# Altium schematic symbol library SmartClimate_BOM.SchLib: 29 symbols
Pins are listed as number, name and electrical type; pins without a type are passive.

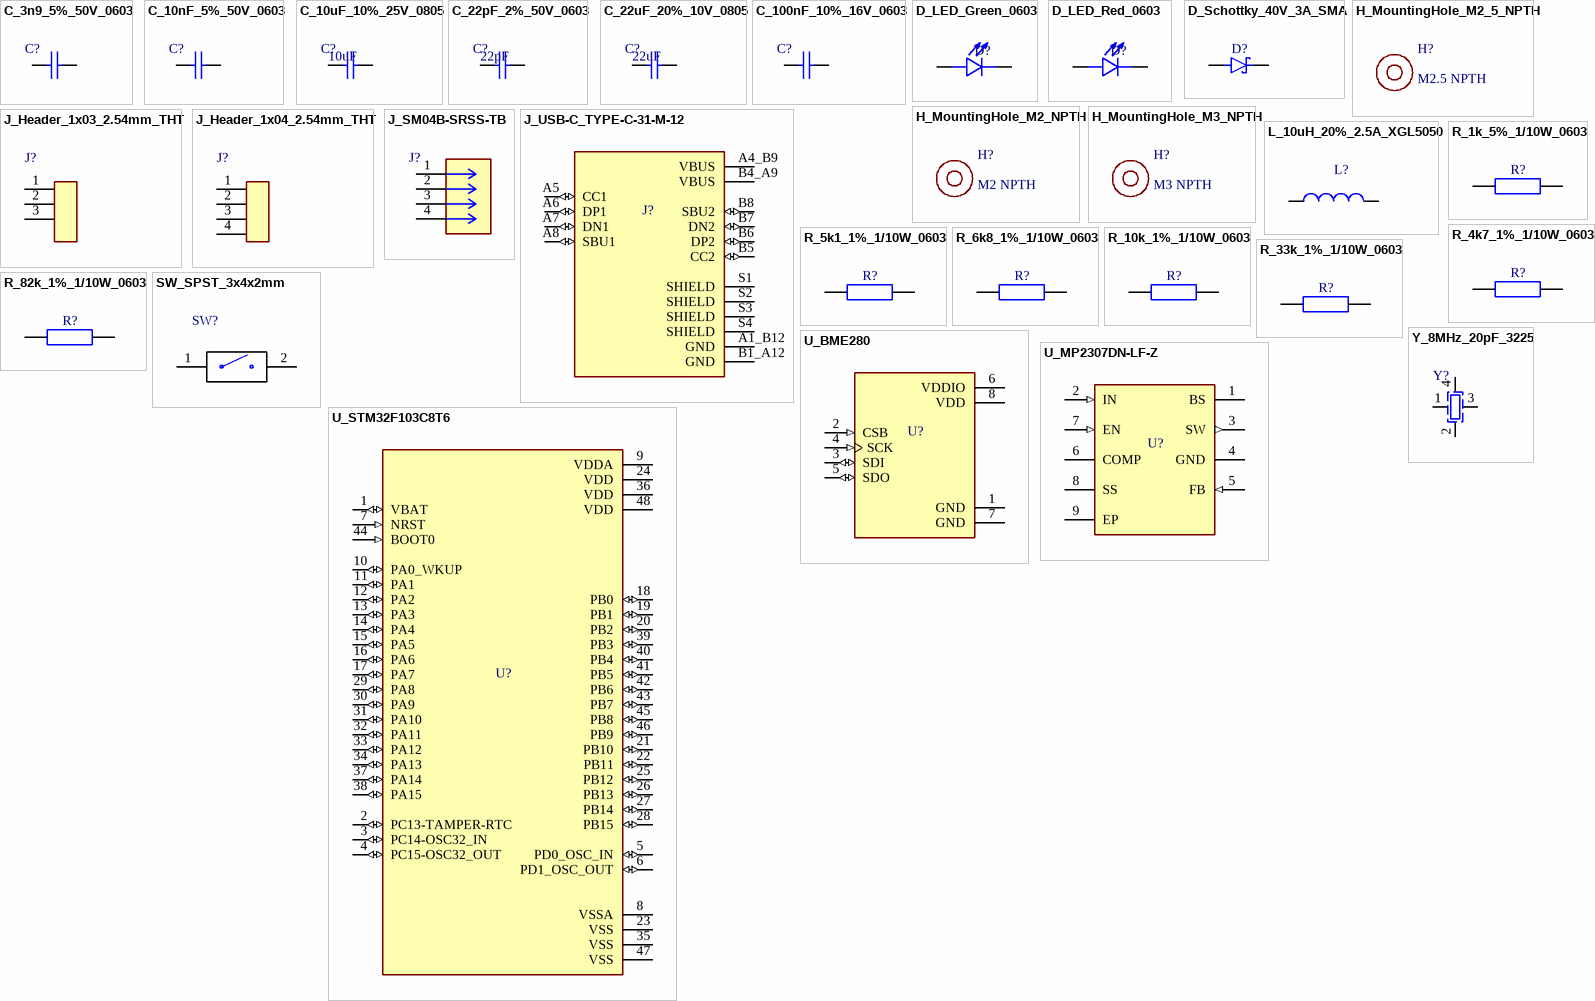
[diagram p0: symbols C_3n9_5%_50V_0603 to Y_8MHz_20pF_3225]

## C_3n9_5%_50V_0603
designator C?, comment 3.9nF  (value not drawn)
3.9nF 5% 50V C0G ceramic capacitor 0603; MP: C1608C0G1H392J080AA; MF: TDK; Value: 3.9nF; Package: 0603; Capacitance: 3.9nF; Tolerance: 5%; Voltage: 50V; Dielectric: C0G; Datasheet: https://product.tdk.com/en/search/capacitor/ceramic/mlcc/info?part_no=C1608C0G1H392J080AA
footprint CAPC1608X95N
pins: 1, 2

## C_10nF_5%_50V_0603
designator C?, comment 10nF  (value not drawn)
10nF +/-5% 50V X7R ceramic capacitor 0603; BOM References: C3; Tolerance: 5%; MP: C0603X103J5RECAUTO; MF: KEMET; Value: 10nF; Package: 0603; Capacitance: 10nF; Voltage: 50V; Dielectric: X7R; Datasheet: https://search.kemet.com/component-documentation/download/specsheet/C0603X103J5RECAUTO
footprint CAPC1608X95N
pins: 1, 2

## C_10uF_10%_25V_0805
designator C?, comment 10uF
10uF +/-10% 25V X5R ceramic capacitor 0805; BOM References: C1,C2; Tolerance: 10%; MP: C0805C106K3PACTU; MF: KEMET; Value: 10uF; Package: 0805; Capacitance: 10uF; Voltage: 25V; Dielectric: X5R; Datasheet: https://search.kemet.com/component-documentation/download/specsheet/C0805C106K3PACTU
footprint CAPC2012X88N
pins: 1, 2

## C_22pF_2%_50V_0603
designator C?, comment 22pF
22pF +/-2% 50V C0G ceramic capacitor 0603; BOM References: C9,C10; Tolerance: 2%; MP: CC0603GRNPO9BN220; MF: Yageo; Value: 22pF; Package: 0603; Capacitance: 22pF; Voltage: 50V; Dielectric: C0G; Datasheet: https://www.yageogroup.com/component-documentation/download/specsheet/CC0603GRNPO9BN220
footprint CAPC1608X90
pins: 1, 2

## C_22uF_20%_10V_0805
designator C?, comment 22uF
22uF 20% 10V X5R ceramic capacitor 0805; MP: C2012X5R1A226M125AB; MF: TDK; Value: 22uF; Package: 0805; Capacitance: 22uF; Tolerance: 20%; Voltage: 10V; Dielectric: X5R; Datasheet: https://product.tdk.com/en/search/capacitor/ceramic/mlcc/info?part_no=C2012X5R1A226M125AB
footprint CAPC2012X88N
pins: 1, 2

## C_100nF_10%_16V_0603
designator C?  (value not drawn)
100nF +/-10% 16V X7R ceramic capacitor 0603; BOM References: C4-C8; Tolerance: 10%; MP: C0603C104K4RACTU; MF: KEMET; Value: 100nF; Package: 0603; Capacitance: 100nF; Voltage: 16V; Dielectric: X7R; Datasheet: https://search.kemet.com/component-documentation/download/specsheet/C0603C104K4RACTU
footprint CAPC1608X95N
pins: 1, 2

## D_LED_Green_0603
designator D?  (value not drawn)
Green LED, 0603 (1608 metric); Value: APT1608SGC; BOM References: LED1; MF: Kingbright; Package: 0603 (1608 Metric); MP: APT1608SGC; Color: Green; Datasheet: https://www.kingbrightusa.com/images/catalog/spec/APT1608SGC.pdf
footprint LED_APT1608SGC
pins: 1 C, 2 A

## D_LED_Red_0603
designator D?  (value not drawn)
Red LED, 0603 (1608 metric); Value: APT1608SURCK; BOM References: LED2,LED3; MF: Kingbright; Package: 0603 (1608 Metric); MP: APT1608SURCK; Color: Red; Datasheet: https://www.kingbrightusa.com/images/catalog/spec/apt1608surck.pdf
footprint LED_APT1608SGC
pins: 1 C, 2 A

## D_Schottky_40V_3A_SMA
designator D?  (value not drawn)
B340A-13-F Schottky rectifier, 40V 3A, SMA DO-214AC; cathode pin1, anode pin2; BOM References: D1; MF: Diodes Incorporated; Value: B340A-13-F; Package: SMA DO-214AC; MP: B340A-13-F; Voltage: 40V; Current: 3A; Datasheet: https://www.diodes.com/part/view/B340A
footprint D_SMA_DO214AC
pins: 1 K, 2 A

## H_MountingHole_M2_5_NPTH
designator H?, comment M2.5 NPTH
Mechanical mounting hole M2.5, 2.7mm NPTH; Screw head clearance: 5.5 mm; Mechanical 15 outline; Hole diameter: 2.7 mm
footprint MH_M2_5_D2_7_NPTH

## H_MountingHole_M2_NPTH
designator H?, comment M2 NPTH
Mechanical mounting hole M2, 2.2mm NPTH; Screw head clearance: 4.5 mm; Mechanical 15 outline; Hole diameter: 2.2 mm
footprint MH_M2_D2_2_NPTH

## H_MountingHole_M3_NPTH
designator H?, comment M3 NPTH
Mechanical mounting hole M3, 3.2mm NPTH; Screw head clearance: 6.5 mm; Mechanical 15 outline; Hole diameter: 3.2 mm
footprint MH_M3_D3_2_NPTH

## J_Header_1x03_2.54mm_THT
designator J?  (value not drawn)
Pin header 1x3, 2.54mm pitch, vertical through hole; Value: TSW-103-07-G-S; BOM References: J4; MF: Samtec; Package: 1x3 P2.54 THT; Pitch: 2.54mm; MP: TSW-103-07-G-S; Number of Pins: 3; Datasheet: https://suddendocs.samtec.com/prints/tsw-xxx-xx-x-x-xx-xxx-footprint.pdf
footprint HDR_1x03_P2.54_THT
pins: 1, 2, 3

## J_Header_1x04_2.54mm_THT
designator J?  (value not drawn)
Pin header 1x4, 2.54mm pitch, vertical through hole; Value: TSW-104-07-G-S; BOM References: J3; MF: Samtec; Package: 1x4 P2.54 THT; Pitch: 2.54mm; MP: TSW-104-07-G-S; Number of Pins: 4; Datasheet: https://suddendocs.samtec.com/prints/tsw-xxx-xx-x-x-xx-xxx-footprint.pdf
footprint HDR_1x04_P2.54_THT
pins: 1, 2, 3, 4

## J_SM04B-SRSS-TB
designator J?  (value not drawn)
JST SH 4-position 1.0mm right-angle side-entry SMT connector; BOM References: J2; Value: SM04B-SRSS-TB; Package: JST SH 1x4 1.0mm SMT; MP: SM04B-SRSS-TB; MF: JST; Pitch: 1.0mm; Datasheet: https://www.jst-mfg.com/product/pdf/eng/eSH.pdf
footprint CONN_SM04B-SRSS-TB_JST
pins: 1, 2, 3, 4

## J_USB-C_TYPE-C-31-M-12
designator J?  (value not drawn)
TYPE-C-31-M-12 USB Type-C USB2.0 receptacle, 16 contacts; BOM References: J1; MF: Korean Hroparts Elec; Value: TYPE-C-31-M-12; Package: SMD top mount; MP: TYPE-C-31-M-12; LCSC: C165948; Datasheet: https://datasheet.lcsc.com/lcsc/1903211732_Korean-Hroparts-Elec-TYPE-C-31-M-12_C165948.pdf
footprint HRO_TYPE-C-31-M-12
pins: A1_B12 GND (power), A4_B9 VBUS (power), A5 CC1 (io), A6 DP1 (io), A7 DN1 (io), A8 SBU1 (io), B1_A12 GND (power), B4_A9 VBUS (power), B5 CC2 (io), B6 DP2 (io), B7 DN2 (io), B8 SBU2 (io), S1 SHIELD, S2 SHIELD, S3 SHIELD, S4 SHIELD

## L_10uH_20%_2.5A_XGL5050
designator L?  (value not drawn)
10uH +/-20% shielded inductor, Isat 2.5A at 10% drop, DCR 33.6mOhm max, Coilcraft XGL5050; BOM References: L1; Tolerance: 20%; Saturation Current Requirement: >=2A; DC Resistance Requirement: <50mOhm; MP: XGL5050-103MEC; Saturation Current: 2.5A at 10% drop; 3.7A at 20% drop; Rated Current: 4.6A at 20C rise; Value: 10uH; Package: 5.28x5.48x5.10mm max height; Inductance: 10uH; MF: Coilcraft; DC Resistance: 33.6mOhm max; Datasheet: https://www.coilcraft.com/getmedia/348b2df6-54b3-4579-8737-e8367b6fa367/xgl5050.pdf
footprint L_XGL5050
pins: 1, 2

## R_1k_5%_1/10W_0603
designator R?, comment RES 1K OHM 5% 1/10W 0603  (value not drawn)
1k Ohms +/-5% 0.1W, 1/10W Chip Resistor 0603 (1608 Metric) Thick Film; BOM References: R7-R9; MP: RC0603JR-071KL; MF: Yageo; Value: 1K; Package: 0603 (1608 Metric); Resistance: 1k; Tolerance: 5%; Power: 0.1W; Technology: Thick Film; Datasheet: https://www.yageo.com/upload/media/product/productsearch/datasheet/rchip/PYu-RC_Group_51_RoHS_L_12.pdf
footprint RESC1608X55N_10K
pins: 1, 2

## R_4k7_1%_1/10W_0603
designator R?, comment RES 4.7K OHM 1% 1/10W 0603  (value not drawn)
4k7 Ohms +/-1% 0.1W, 1/10W Chip Resistor 0603 (1608 Metric) Thick Film; BOM References: R3,R4; MP: RC0603FR-074K7L; MF: Yageo; Value: 4.7K; Package: 0603 (1608 Metric); Resistance: 4k7; Tolerance: 1%; Power: 0.1W; Technology: Thick Film; Datasheet: https://www.yageo.com/upload/media/product/productsearch/datasheet/rchip/PYu-RC_Group_51_RoHS_L_12.pdf
footprint RESC1608X55N_10K
pins: 1, 2

## R_5k1_1%_1/10W_0603
designator R?, comment RES 5.1K OHM 1% 1/10W 0603  (value not drawn)
5k1 Ohms +/-1% 0.1W, 1/10W Chip Resistor 0603 (1608 Metric) Thick Film; BOM References: R1,R2; MP: RC0603FR-075K1L; MF: Yageo; Value: 5.1K; Package: 0603 (1608 Metric); Resistance: 5k1; Tolerance: 1%; Power: 0.1W; Technology: Thick Film; Datasheet: https://www.yageo.com/upload/media/product/productsearch/datasheet/rchip/PYu-RC_Group_51_RoHS_L_12.pdf
footprint RESC1608X55N_10K
pins: 1, 2

## R_6k8_1%_1/10W_0603
designator R?, comment 6.8K  (value not drawn)
6.8kOhm 1% 0.1W thick film resistor 0603; Resistance: 6k8; MP: RC0603FR-076K8L; MF: Yageo; Value: 6.8K; Package: 0603 (1608 Metric); Tolerance: 1%; Power: 0.1W; Technology: Thick Film; Datasheet: https://www.yageogroup.com/component-documentation/download/specsheet/RC0603FR-076K8L
footprint RESC1608X55N
pins: 1, 2

## R_10k_1%_1/10W_0603
designator R?, comment RES 10K OHM 1% 1/10W 0603  (value not drawn)
10k Ohms +/-1% 0.1W, 1/10W Chip Resistor 0603 (1608 Metric) Thick Film; BOM References: R10; MP: RC0603FR-0710KL; MF: Yageo; Value: 10K; Package: 0603 (1608 Metric); Resistance: 10k; Tolerance: 1%; Power: 0.1W; Technology: Thick Film; Datasheet: https://www.yageo.com/upload/media/product/productsearch/datasheet/rchip/PYu-RC_Group_51_RoHS_L_12.pdf
footprint RESC1608X55N_10K
pins: 1, 2

## R_33k_1%_1/10W_0603
designator R?, comment RES 33K OHM 1% 1/10W 0603  (value not drawn)
33k Ohms +/-1% 0.1W, 1/10W Chip Resistor 0603 (1608 Metric) Thick Film; BOM References: R6; MP: RC0603FR-0733KL; MF: Yageo; Value: 33K; Package: 0603 (1608 Metric); Resistance: 33k; Tolerance: 1%; Power: 0.1W; Technology: Thick Film; Datasheet: https://www.yageo.com/upload/media/product/productsearch/datasheet/rchip/PYu-RC_Group_51_RoHS_L_12.pdf
footprint RESC1608X55N_10K
pins: 1, 2

## R_82k_1%_1/10W_0603
designator R?, comment RES 82K OHM 1% 1/10W 0603  (value not drawn)
82k Ohms +/-1% 0.1W, 1/10W Chip Resistor 0603 (1608 Metric) Thick Film; BOM References: R5; MP: RC0603FR-0782KL; MF: Yageo; Value: 82K; Package: 0603 (1608 Metric); Resistance: 82k; Tolerance: 1%; Power: 0.1W; Technology: Thick Film; Datasheet: https://www.yageo.com/upload/media/product/productsearch/datasheet/rchip/PYu-RC_Group_51_RoHS_L_12.pdf
footprint RESC1608X55N_10K
pins: 1, 2

## SW_SPST_3x4x2mm
designator SW?  (value not drawn)
Hanxia HX 3x4x2-2P-2.5N tactile switch, SPST-NO, 50mA 12V, 4x3x2mm; BOM References: SW1,SW2; Operating Force: 2.5N; Value: HX 3x4x2-2P-2.5N; Package: 3x4x2mm; MP: HX 3x4x2-2P-2.5N; MF: Hanxia; Configuration: SPST-NO; LCSC: C36498961; Voltage: 12V; Current: 50mA; Datasheet: https://atta.szlcsc.com/upload/public/pdf/source/20250707/B47B221526B87D575FBEDE6D3B809220.pdf
footprint SW_HX_3x4x2_2P
pins: 1, 2

## U_BME280
designator U?  (value not drawn)
BME280 temperature, humidity and pressure sensor, LGA-8 2.5x2.5mm; BOM References: U3; MF: Bosch; Value: BME280; Package: LGA-8 (2.5x2.5mm); MP: BME280; Datasheet: https://www.bosch-sensortec.com/media/boschsensortec/downloads/datasheets/bst-bme280-ds002.pdf
footprint PSON65P250X250X100-8N
pins: 1 GND (power), 2 CSB (in), 3 SDI (io), 4 SCK (in), 5 SDO (io), 6 VDDIO (power), 7 GND (power), 8 VDD (power)

## U_MP2307DN-LF-Z
designator U?  (value not drawn)
MP2307DN-LF-Z 3A, 23V, 340kHz step-down DC-DC regulator, SOIC-8-EP; BOM References: U2; MF: Monolithic Power Systems; Value: 340kHz; Package: SOIC-8-EP; MP: MP2307DN-LF-Z; Current: 3A; Voltage: 23V; Frequency: 340kHz; Datasheet: https://www.monolithicpower.com/en/mp2307.html
footprint SOIC127P600X170-9N
pins: 1 BS, 2 IN (in), 3 SW (out), 4 GND (power), 5 FB (in), 6 COMP, 7 EN (in), 8 SS, 9 EP (power)

## U_STM32F103C8T6
designator U?  (value not drawn)
STM32F103C8T6 32-bit Cortex-M3 MCU, 64KB Flash, 72MHz, LQFP-48 7x7mm; BOM References: U1; MF: STMicroelectronics; Value: 72MHz; Package: LQFP-48 (7x7mm); MP: STM32F103C8T6; Flash: 64KB; Frequency: 72MHz; Datasheet: https://www.st.com/resource/en/datasheet/stm32f103c8.pdf
footprint QFP50P900X900X160-48N
pins: 1 VBAT (io), 2 PC13-TAMPER-RTC (io), 3 PC14-OSC32_IN (io), 4 PC15-OSC32_OUT (io), 5 PD0_OSC_IN (io), 6 PD1_OSC_OUT (io), 7 NRST (in), 8 VSSA (power), 9 VDDA (power), 10 PA0_WKUP (io), 11 PA1 (io), 12 PA2 (io), 13 PA3 (io), 14 PA4 (io), 15 PA5 (io), 16 PA6 (io), 17 PA7 (io), 18 PB0 (io), 19 PB1 (io), 20 PB2 (io), 21 PB10 (io), 22 PB11 (io), 23 VSS (power), 24 VDD (power), 25 PB12 (io), 26 PB13 (io), 27 PB14 (io), 28 PB15 (io), 29 PA8 (io), 30 PA9 (io), 31 PA10 (io), 32 PA11 (io), 33 PA12 (io), 34 PA13 (io), 35 VSS (power), 36 VDD (power), 37 PA14 (io), 38 PA15 (io), 39 PB3 (io), 40 PB4 (io), 41 PB5 (io), 42 PB6 (io), 43 PB7 (io), 44 BOOT0 (in), 45 PB8 (io), 46 PB9 (io), 47 VSS (power), 48 VDD (power)

## Y_8MHz_20pF_3225
designator Y?  (value not drawn)
ECS-80-20-33-JEN-TR3 8MHz quartz crystal, CL20pF, +/-20ppm, 3225 4-pad; BOM References: X1; Load Capacitance: 20pF; MF: ECS Inc.; Frequency Stability: +/-50ppm; Value: 8MHz; Package: 3225 4-pad; Frequency: 8MHz; Frequency Tolerance: +/-20ppm; MP: ECS-80-20-33-JEN-TR3; Datasheet: https://ecsxtal.com/store/pdf/ecx-32.pdf
footprint XTAL_ECX32_3225_4P
pins: 1, 2, 3, 4